# Altium footprint library clusterhead.PcbLib: 75 footprints (part 4 of 5)
Each footprint in its own frame and in the unit in brackets; x right, y up, seen from the top. Pads: shape width x height; smd on the part's side, far side on the other; paste and mask are expansions set on the pad; w line width, h text height; cw(c..) or ccw(c..) is an arc to the next point about the centre after c.
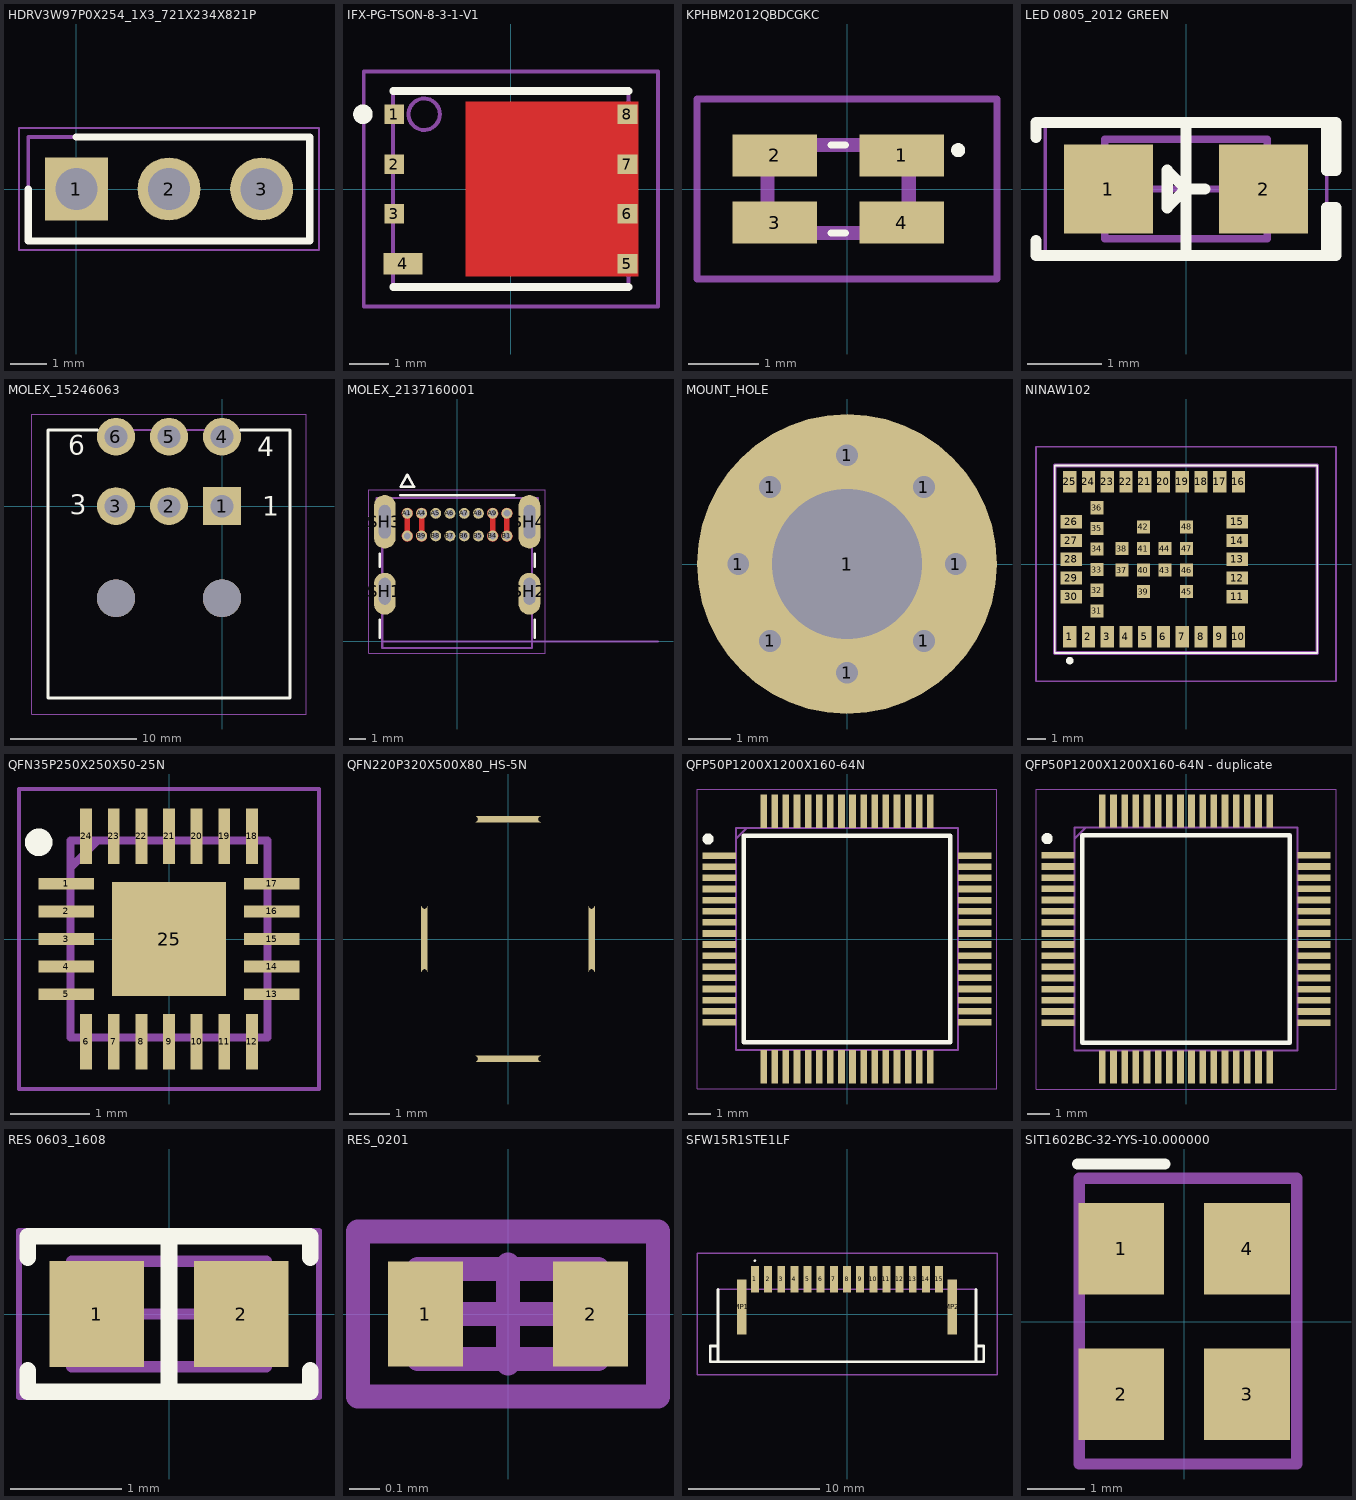
[diagram p3: the footprints below, top view; thin cyan lines are the x and y axes]

## HDRV3W97P0X254_1X3_721X234X821P [mm]
pads (3):
  rect 1.725x1.725 hole 1.15: 1(0,0)
  round 1.725 hole 1.15: 2(2.54,0) 3(5.08,0)
Top Overlay:
  lines w0.2: -1.32,0 -1.32,-1.425 6.4,-1.425 6.4,1.425 0,1.425
Mechanical 13:
  lines w0.1: -1.32,-1.425 -1.32,1.425 6.4,1.425 6.4,-1.425 -1.32,-1.425
Mechanical 15:
  lines w0.05: -1.57,-1.675 -1.57,1.675 6.65,1.675 6.65,-1.675 -1.57,-1.675
3D body "5-146280-3.stp": height 8.12, standoff -3.05, extent -1.067,-1.168 6.147,1.168

## IFX-PG-TSON-8-3-1-V1 [mm] "Transistor; 1.27mm pitch, 8 pin, 6.00mm L X 5.00mm W X 1.1mm H body"
height 1.1
pads (8):
  rect 0.5x0.5 smd paste-0.5 mask-0.5: 1(-2.972,1.905) 2(-2.972,0.635) 3(-2.972,-0.635) 5(2.972,-1.905) 6(2.972,-0.635) 7(2.972,0.635) 8(2.972,1.905)
  rect 1x0.54 smd paste-1 mask+0: 4(-2.75,-1.905)
Top Layer:
  region: 3.25,2.225 3.25,-2.225 -1.15,-2.225 -1.15,2.225
Top Overlay:
  circle w0.25: c-3.772,1.905 r0.125
  lines w0.2: -3,-2.5 3,-2.5 ; -3,2.5 3,2.5
Top Paste:
  region: -2.3,-0.215 -2.3,0.215 -2.75,0.215 -2.75,-0.215
  region: -2.3,1.055 -2.3,1.485 -2.75,1.485 -2.75,1.055
  region: -2.3,-0.856 -2.3,-0.416 -3.2,-0.416 -3.2,-0.856
  region: -2.3,0.415 -2.3,0.855 -3.2,0.855 -3.2,0.415
  region: -2.3,1.685 -2.3,2.125 -3.2,2.125 -3.2,1.685
  region: -2.42,-2.125 -2.42,-1.685 -3.2,-1.685 -3.2,-2.125
  region: 0.675,0.1 0.675,1.6 2.175,1.6 2.175,0.1
  region: 0.675,-1.6 0.675,-0.1 2.175,-0.1 2.175,-1.6
  region: 2.38,-2.125 2.38,-1.685 3.2,-1.685 3.2,-2.125
  region: -1.025,-1.6 -1.025,-0.1 0.475,-0.1 0.475,-1.6
  region: -1.025,0.1 -1.025,1.6 0.475,1.6 0.475,0.1
  region: 2.38,1.685 2.38,2.125 3.2,2.125 3.2,1.685
  region: 2.38,0.855 2.38,0.415 3.2,0.415 3.2,0.855
  region: 2.38,-0.415 2.38,-0.855 3.2,-0.855 3.2,-0.415
Top Solder:
  region: -1.15,2.225 2.52,2.225 2.52,2.175 3.25,2.175 3.25,1.635 2.52,1.635 2.52,0.905 3.25,0.905 3.25,0.365 2.52,0.365 2.52,-0.365 3.25,-0.365 3.25,-0.905 2.52,-0.905 2.52,-1.635 3.25,-1.635 3.25,-2.175 2.52,-2.175 2.52,-2.225 -1.15,-2.225
  region: -3.25,2.175 -2.25,2.175 -2.25,-0.905 -3.25,-0.905 -3.25,-0.365 -2.8,-0.365 -2.8,0.365 -3.25,0.365 -3.25,0.905 -2.8,0.905 -2.8,1.635 -3.25,1.635
Top Courtyard:
  text ".DESIGNATOR" at -3.643,-0.385 h1.2
Mechanical 13:
  circle w0.1: c-2.21,1.905 r0.4
  lines w0.1: -3,-2.5 -3,2.5 3,2.5 3,-2.5 -3,-2.5
Mechanical 15:
  lines w0.1: -0.5,0 0.5,0 ; 0,-0.5 0,0.5 ; -3.75,-3 3.75,-3 3.75,3 -3.75,3 -3.75,-3
3D body "PG-TSON-8-3_Z8B00184858_V02_3D.stp": height 1.11, standoff 0, extent -3,-2.5 3,2.5

## KPHBM2012QBDCGKC [mm]
pads (4):
  rect 1.2x0.6 smd: 1(0.775,0.475) 2(-1.025,0.475) 3(-1.025,-0.475) 4(0.775,-0.475)
Top Overlay:
  lines w0.1: -0.225,-0.625 -0.025,-0.625 ; -0.225,0.625 -0.025,0.625 ; 1.575,0.5 ccw(c1.575,0.55) 1.575,0.6 ccw(c1.575,0.55) 1.575,0.5
Mechanical 13:
  lines w0.2: -1.125,-0.625 0.875,-0.625 0.875,0.625 -1.125,0.625 -1.125,-0.625
Mechanical 15:
  lines w0.1: -2.125,-1.275 2.125,-1.275 2.125,1.275 -2.125,1.275 -2.125,-1.275
3D body "APHBM2012LSURKZGKC.stp": height 0.45, standoff 0, extent -1,-0.625 1,0.625

## LED 0805_2012 GREEN [mm] "Chip Diode, 2-Leads, Body 2.00x1.25mm, IPC Medium Density"
height 0.7
pads (2):
  rect 1.2x1.2 smd: 1(-1.05,0) 2(1.05,0)
Top Overlay:
  lines w0.15: -2.032,-0.7 -2.032,-0.9 1.905,-0.9 ; -2.032,0.7 -2.032,0.9 1.905,0.9 ; 0,-0.9 0,0.9 ; 0.254,0 0,0 ; 0,0 -0.254,0.254 -0.254,-0.254 0,0 ; 1.905,-0.9 1.905,-0.254 2.032,-0.254 2.032,-0.9 1.905,-0.9 ; 1.905,0.9 1.905,0.254 2.032,0.254 2.032,0.9 1.905,0.9
Mechanical 13:
  lines w0.1: -1.1,-0.675 1.1,-0.675 1.1,0.675 -1.1,0.675 -1.1,-0.675
Mechanical 15:
  lines w0.05: -1.905,-0.95 1.905,-0.95 1.905,0.95 -1.905,0.95 -1.905,-0.95
  lines w0.1: -0.5,0 0.5,0 ; 0,-0.5 0,0.5
3D body "LED 0805 Base GREEN.STEP": height 0.4, standoff 0, extent -1,-0.625 1,0.625
3D body "LED 0805 Lens GREEN.STEP": height 0.9, standoff 0.3, extent -0.65,-0.625 0.65,0.625

## MOLEX_15246063 [mm]
height 15
pads (8):
  rect 3x3 / inner round 3 / far side rect 3x3 hole 1.8: 1(0,0)
  round 3 hole 1.8: 2(-4.2,0) 3(-8.4,0) 4(0,5.5) 5(-4.2,5.5) 6(-8.4,5.5)
  round 3 hole 3 unplated mask+0.076: ""(-8.4,-7.3) ""(0,-7.3)
Top Overlay:
  lines w0.25: -9.876,6.03 -13.8,6.03 -13.8,-15.2 5.4,-15.2 5.4,6.03 1.476,6.03
  text "6" at -12.192,4.064 h1.52
  text "3" at -12.065,-0.635 h1.52
  text "4" at 2.794,3.937 h1.52
  text "1" at 3.175,-0.762 h1.52
Mechanical 13:
  lines w0.127: -13.8,-15.2 -13.8,6.03 5.4,6.03 5.4,-15.2 -13.8,-15.2
Mechanical 15:
  lines w0.05: -15.07,-16.47 -15.07,7.3 6.67,7.3 6.67,-16.47 -15.07,-16.47
3D body "15246063.stp": height 15, standoff -3.6, extent -13.866,-15.185 5.334,6.041

## MOLEX_2137160001 [mm]
height 3.36
pads (20):
  round 0.648 hole 0.4 mask+0.064: A1(-2.975,7.65) A4(-2.125,7.65) A5(-1.275,7.65) A6(-0.425,7.65) A7(0.425,7.65) A8(1.275,7.65) A9(2.125,7.65) A12(2.975,7.65) B1(2.975,6.3) B4(2.125,6.3) B5(1.275,6.3) B6(0.425,6.3) B7(-0.425,6.3) B8(-1.275,6.3) B9(-2.125,6.3) B12(-2.975,6.3)
  oval 1.3x2.5 hole 0.7 slot 1.6 at 90 deg copper offset 0,-0.15 mask+0.064: SH1(-4.32,3) SH2(4.32,3)
  oval 1.3x3.2 hole 0.7 slot 2 at 90 deg mask+0.064: SH3(-4.32,7.15) SH4(4.32,7.15)
Top Layer:
  region: 3.032,7.969 3.087,7.954 3.139,7.929 3.186,7.896 3.226,7.855 3.258,7.808 3.281,7.756 3.295,7.7 3.299,7.643 3.293,7.586 3.277,7.531 3.251,7.48 3.217,7.434 3.175,7.395 3.125,7.363 3.125,6.587 3.175,6.555 3.217,6.516 3.251,6.47 3.277,6.419 3.293,6.364 3.299,6.307 3.295,6.25 3.281,6.194 3.258,6.142 3.226,6.095 3.186,6.054 3.139,6.021 3.087,5.996 3.032,5.981 2.975,5.976 2.918,5.981 2.863,5.996 2.811,6.021 2.764,6.054 2.724,6.095 2.692,6.142 2.669,6.194 2.655,6.25 2.651,6.307 2.657,6.364 2.673,6.419 2.699,6.47 2.733,6.516 2.775,6.555 2.825,6.587 2.825,7.363 2.775,7.395 2.733,7.434 2.699,7.48 2.673,7.531 2.657,7.586 2.651,7.643 2.655,7.7 2.669,7.756 2.692,7.808 2.724,7.855 2.764,7.896 2.811,7.929 2.863,7.954 2.918,7.969 2.975,7.974
  region: 2.182,7.969 2.237,7.954 2.289,7.929 2.336,7.896 2.376,7.855 2.408,7.808 2.431,7.756 2.445,7.7 2.449,7.643 2.443,7.586 2.427,7.531 2.401,7.48 2.367,7.434 2.325,7.395 2.275,7.363 2.275,6.587 2.325,6.555 2.367,6.516 2.401,6.47 2.427,6.419 2.443,6.364 2.449,6.307 2.445,6.25 2.431,6.194 2.408,6.142 2.376,6.095 2.336,6.054 2.289,6.021 2.237,5.996 2.182,5.981 2.125,5.976 2.068,5.981 2.013,5.996 1.961,6.021 1.914,6.054 1.874,6.095 1.842,6.142 1.819,6.194 1.805,6.25 1.801,6.307 1.807,6.364 1.823,6.419 1.849,6.47 1.883,6.516 1.925,6.555 1.975,6.587 1.975,7.363 1.925,7.395 1.883,7.434 1.849,7.48 1.823,7.531 1.807,7.586 1.801,7.643 1.805,7.7 1.819,7.756 1.842,7.808 1.874,7.855 1.914,7.896 1.961,7.929 2.013,7.954 2.068,7.969 2.125,7.974
  region: -2.068,7.969 -2.013,7.954 -1.961,7.929 -1.914,7.896 -1.874,7.855 -1.842,7.808 -1.819,7.756 -1.805,7.7 -1.801,7.643 -1.807,7.586 -1.823,7.531 -1.849,7.48 -1.883,7.434 -1.925,7.395 -1.975,7.363 -1.975,6.587 -1.925,6.555 -1.883,6.516 -1.849,6.47 -1.823,6.419 -1.807,6.364 -1.801,6.307 -1.805,6.25 -1.819,6.194 -1.842,6.142 -1.874,6.095 -1.914,6.054 -1.961,6.021 -2.013,5.996 -2.068,5.981 -2.125,5.976 -2.182,5.981 -2.237,5.996 -2.289,6.021 -2.336,6.054 -2.376,6.095 -2.408,6.142 -2.431,6.194 -2.445,6.25 -2.449,6.307 -2.443,6.364 -2.427,6.419 -2.401,6.47 -2.367,6.516 -2.325,6.555 -2.275,6.587 -2.275,7.363 -2.325,7.395 -2.367,7.434 -2.401,7.48 -2.427,7.531 -2.443,7.586 -2.449,7.643 -2.445,7.7 -2.431,7.756 -2.408,7.808 -2.376,7.855 -2.336,7.896 -2.289,7.929 -2.237,7.954 -2.182,7.969 -2.125,7.974
  region: -2.918,7.969 -2.863,7.954 -2.811,7.929 -2.764,7.896 -2.724,7.855 -2.692,7.808 -2.669,7.756 -2.655,7.7 -2.651,7.643 -2.657,7.586 -2.673,7.531 -2.699,7.48 -2.733,7.434 -2.775,7.395 -2.825,7.363 -2.825,6.587 -2.775,6.555 -2.733,6.516 -2.699,6.47 -2.673,6.419 -2.657,6.364 -2.651,6.307 -2.655,6.25 -2.669,6.194 -2.692,6.142 -2.724,6.095 -2.764,6.054 -2.811,6.021 -2.863,5.996 -2.918,5.981 -2.975,5.976 -3.032,5.981 -3.087,5.996 -3.139,6.021 -3.186,6.054 -3.226,6.095 -3.258,6.142 -3.281,6.194 -3.295,6.25 -3.299,6.307 -3.293,6.364 -3.277,6.419 -3.251,6.47 -3.217,6.516 -3.175,6.555 -3.125,6.587 -3.125,7.363 -3.175,7.395 -3.217,7.434 -3.251,7.48 -3.277,7.531 -3.293,7.586 -3.299,7.643 -3.295,7.7 -3.281,7.756 -3.258,7.808 -3.226,7.855 -3.186,7.896 -3.139,7.929 -3.087,7.954 -3.032,7.969 -2.975,7.974
Top Overlay:
  lines w0.15: -4.625,0.225 -4.625,1.3 ; -4.625,4.45 -4.625,5.25 ; -3.4,8.72 3.4,8.72 ; 4.625,0.225 4.625,1.3 ; 4.625,4.45 4.625,5.25 ; -3.375,9.25 -2.975,9.95 -2.575,9.25 -3.375,9.25
Top Solder:
  drawing of 4 lines, arcs and shapes, not listed
Top Courtyard:
  text "'.Designator'" at 0,4.625 h0.7
Mechanical 12:
  text "PTH Slot 1.6 +/- 0.05 X 0.7 +/- 0.05" at -4.878,12.053 h0.5
  text "PTH Slot 2.0 +/- 0.05 X 0.7 +/- 0.05" at -4.878,12.688 h0.5
Mechanical 13:
  lines w0.13: 12,0 -4.475,0 ; -4.475,0 -4.475,-0.4 4.475,-0.4 4.475,6.17 4.82,6.17 4.82,8.57 -4.82,8.57 -4.82,6.17 -4.475,6.17 -4.475,0 ; -3.375,9.25 -2.975,9.95 -2.575,9.25 -3.375,9.25
  text "PCB Edge" at 5.5,0.25 h1
Mechanical 15:
  lines w0.01: -5.27,-0.7 5.27,-0.7 5.27,9.05 -5.27,9.05 -5.27,-0.7
3D body "2137160001.stp": height 3.17, standoff -1.19, extent -4.82,-0.421 4.82,8.549

## MOUNT_HOLE [mil]
pads (9):
  round 20 hole 20: 1(-100,0) 1(-70.71,-70.71) 1(-70.71,70.71) 1(0,-100) 1(0,100) 1(70.71,-70.71) 1(70.71,70.71) 1(100,0)
  round 275.59 hole 137.8: 1(0,0)

## NINAW102 [mm]
pads (48):
  rect 0.7x1.15 smd: 1(-6.2,-3.875) 2(-5.2,-3.875) 3(-4.2,-3.875) 4(-3.2,-3.875) 5(-2.2,-3.875) 6(-1.2,-3.875) 7(-0.2,-3.875) 8(0.8,-3.875) 9(1.8,-3.875) 10(2.8,-3.875) 16(2.8,4.375) 17(1.8,4.375) 18(0.8,4.375) 19(-0.2,4.375) 20(-1.2,4.375) 21(-2.2,4.375) 22(-3.2,4.375) 23(-4.2,4.375) 24(-5.2,4.375) 25(-6.2,4.375)
  rect 1.15x0.7 smd: 11(2.725,-1.75) 12(2.725,-0.75) 13(2.725,0.25) 14(2.725,1.25) 15(2.725,2.25) 26(-6.125,2.25) 27(-6.125,1.25) 28(-6.125,0.25) 29(-6.125,-0.75) 30(-6.125,-1.75)
  rect 0.7x0.7 smd: 31(-4.75,-2.5) 32(-4.75,-1.4) 33(-4.75,-0.3) 34(-4.75,0.8) 35(-4.75,1.9) 36(-4.75,3) 37(-3.42,-0.325) 38(-3.42,0.825) 39(-2.27,-1.475) 40(-2.27,-0.325) 41(-2.27,0.825) 42(-2.27,1.975) 43(-1.12,-0.325) 44(-1.12,0.825) 45(0.03,-1.475) 46(0.03,-0.325) 47(0.03,0.825) 48(0.03,1.975)
Top Overlay:
  lines w0.1: -7,-4.75 -7,5.25 7,5.25 7,-4.75 -7,-4.75
  lines w0.2: -6.3,-5.15 ccw(c-6.2,-5.15) -6.1,-5.15 ccw(c-6.2,-5.15) -6.3,-5.15
Mechanical 13:
  lines w0.2: -7,-4.75 -7,5.25 7,5.25 7,-4.75 -7,-4.75
Mechanical 15:
  lines w0.1: -8,-6.25 -8,6.25 8,6.25 8,-6.25 -8,-6.25
3D body "NINA-W102.stp": height 3.1, standoff 0, extent -7,-4.75 7,5.25

## QFN35P250X250X50-25N [mm]
pads (25):
  rect 0.7x0.15 smd: 1(-1.3,0.7) 2(-1.3,0.35) 3(-1.3,0) 4(-1.3,-0.35) 5(-1.3,-0.7) 13(1.3,-0.7) 14(1.3,-0.35) 15(1.3,0) 16(1.3,0.35) 17(1.3,0.7)
  rect 0.15x0.7 smd: 6(-1.05,-1.3) 7(-0.7,-1.3) 8(-0.35,-1.3) 9(0,-1.3) 10(0.35,-1.3) 11(0.7,-1.3) 12(1.05,-1.3) 18(1.05,1.3) 19(0.7,1.3) 20(0.35,1.3) 21(0,1.3) 22(-0.35,1.3) 23(-0.7,1.3) 24(-1.05,1.3)
  rect 1.45x1.45 smd: 25(0,0)
Top Overlay:
  circle w0.175: c-1.649,1.225 r0.088
Mechanical 13:
  lines w0.1: -1.25,0.9 -0.9,1.25 ; -1.25,-1.25 -1.25,1.25 1.25,1.25 1.25,-1.25 -1.25,-1.25
Mechanical 15:
  lines w0.05: -1.9,-1.9 -1.9,1.9 1.9,1.9 1.9,-1.9 -1.9,-1.9
3D body "PI3WVR626XEBEX.stp": height 0.5, standoff 0, extent -1.3,-1.3 1.3,1.3

## QFN220P320X500X80_HS-5N [mm] "QFN, 4-Leads, Body 3.20x5.00mm, Pitch 2.54mm/2.20mm, Thermal Pad 4.04x3.80mm, IPC Medium Density"
height 0.8
pads (4):
  oval 0x1.5 smd: 1(-2.075,0) 3(2.075,0)
  oval 1.5x0 smd: 2(0,-2.975) 4(0,2.975)

## QFP50P1200X1200X160-64N [mm]
pads (64):
  rect 1.5x0.3 smd: 1(-5.75,3.75) 2(-5.75,3.25) 3(-5.75,2.75) 4(-5.75,2.25) 5(-5.75,1.75) 6(-5.75,1.25) 7(-5.75,0.75) 8(-5.75,0.25) 9(-5.75,-0.25) 10(-5.75,-0.75) 11(-5.75,-1.25) 12(-5.75,-1.75) 13(-5.75,-2.25) 14(-5.75,-2.75) 15(-5.75,-3.25) 16(-5.75,-3.75) 33(5.75,-3.75) 34(5.75,-3.25) 35(5.75,-2.75) 36(5.75,-2.25) 37(5.75,-1.75) 38(5.75,-1.25) 39(5.75,-0.75) 40(5.75,-0.25) 41(5.75,0.25) 42(5.75,0.75) 43(5.75,1.25) 44(5.75,1.75) 45(5.75,2.25) 46(5.75,2.75) 47(5.75,3.25) 48(5.75,3.75)
  rect 0.3x1.5 smd: 17(-3.75,-5.75) 18(-3.25,-5.75) 19(-2.75,-5.75) 20(-2.25,-5.75) 21(-1.75,-5.75) 22(-1.25,-5.75) 23(-0.75,-5.75) 24(-0.25,-5.75) 25(0.25,-5.75) 26(0.75,-5.75) 27(1.25,-5.75) 28(1.75,-5.75) 29(2.25,-5.75) 30(2.75,-5.75) 31(3.25,-5.75) 32(3.75,-5.75) 49(3.75,5.75) 50(3.25,5.75) 51(2.75,5.75) 52(2.25,5.75) 53(1.75,5.75) 54(1.25,5.75) 55(0.75,5.75) 56(0.25,5.75) 57(-0.25,5.75) 58(-0.75,5.75) 59(-1.25,5.75) 60(-1.75,5.75) 61(-2.25,5.75) 62(-2.75,5.75) 63(-3.25,5.75) 64(-3.75,5.75)
Top Overlay:
  circle w0.25: c-6.25,4.5 r0.125
  lines w0.2: -4.65,-4.65 -4.65,4.65 4.65,4.65 4.65,-4.65 -4.65,-4.65
Mechanical 13:
  lines w0.1: -5,4.5 -4.5,5 ; -5,-5 -5,5 5,5 5,-5 -5,-5
Mechanical 15:
  lines w0.05: -6.75,-6.75 -6.75,6.75 6.75,6.75 6.75,-6.75 -6.75,-6.75
3D body "FT4232HL-TRAY.stp": height 1.6, standoff 0, extent -6,-6 6,6

## QFP50P1200X1200X160-64N - duplicate [mm]
pads (64):
  rect 1.475x0.3 smd: 1(-5.738,3.75) 2(-5.738,3.25) 3(-5.738,2.75) 4(-5.738,2.25) 5(-5.738,1.75) 6(-5.738,1.25) 7(-5.738,0.75) 8(-5.738,0.25) 9(-5.738,-0.25) 10(-5.738,-0.75) 11(-5.738,-1.25) 12(-5.738,-1.75) 13(-5.738,-2.25) 14(-5.738,-2.75) 15(-5.738,-3.25) 16(-5.738,-3.75) 33(5.738,-3.75) 34(5.738,-3.25) 35(5.738,-2.75) 36(5.738,-2.25) 37(5.738,-1.75) 38(5.738,-1.25) 39(5.738,-0.75) 40(5.738,-0.25) 41(5.738,0.25) 42(5.738,0.75) 43(5.738,1.25) 44(5.738,1.75) 45(5.738,2.25) 46(5.738,2.75) 47(5.738,3.25) 48(5.738,3.75)
  rect 0.3x1.475 smd: 17(-3.75,-5.738) 18(-3.25,-5.738) 19(-2.75,-5.738) 20(-2.25,-5.738) 21(-1.75,-5.738) 22(-1.25,-5.738) 23(-0.75,-5.738) 24(-0.25,-5.738) 25(0.25,-5.738) 26(0.75,-5.738) 27(1.25,-5.738) 28(1.75,-5.738) 29(2.25,-5.738) 30(2.75,-5.738) 31(3.25,-5.738) 32(3.75,-5.738) 49(3.75,5.738) 50(3.25,5.738) 51(2.75,5.738) 52(2.25,5.738) 53(1.75,5.738) 54(1.25,5.738) 55(0.75,5.738) 56(0.25,5.738) 57(-0.25,5.738) 58(-0.75,5.738) 59(-1.25,5.738) 60(-1.75,5.738) 61(-2.25,5.738) 62(-2.75,5.738) 63(-3.25,5.738) 64(-3.75,5.738)
Top Overlay:
  circle w0.25: c-6.225,4.5 r0.125
  lines w0.2: -4.65,-4.65 4.65,-4.65 4.65,4.65 -4.65,4.65 -4.65,-4.65
Mechanical 13:
  lines w0.1: -5,4.5 -4.5,5 ; -5,-5 5,-5 5,5 -5,5 -5,-5
Mechanical 15:
  lines w0.05: -6.725,-6.725 6.725,-6.725 6.725,6.725 -6.725,6.725 -6.725,-6.725
3D body "STM32G431RBT6.stp": height 1.6, standoff 0, extent -6,-6 6,6

## RES 0603_1608 [mm] "Chip Resistor, 2-Leads, Body 1.60x0.80mm, IPC Medium Density"
height 0.45
pads (2):
  rect 0.85x0.95 smd: 1(-0.65,0) 2(0.65,0)
Top Overlay:
  lines w0.15: -1.27,-0.508 -1.27,-0.7 1.27,-0.7 1.27,-0.508 ; -1.27,0.508 -1.27,0.7 1.27,0.7 1.27,0.508 ; 0,-0.7 0,0.7
Mechanical 13:
  lines w0.1: -0.875,-0.475 -0.875,0.475 0.875,0.475 0.875,-0.475 -0.875,-0.475
Mechanical 15:
  lines w0.05: -1.35,-0.75 -1.35,0.75 1.35,0.75 1.35,-0.75 -1.35,-0.75
  lines w0.1: -0.475,0 0.475,0 ; 0,-0.475 0,0.475
3D body "0603 resistor.STEP": height 0.45, standoff 0, extent -0.8,-0.4 0.8,0.4

## RES_0201 [mm] "Chip Resistor, 2-Leads, Body 0.60x0.30mm, IPC Medium Density"
height 0.26
pads (2):
  rect 0.25x0.35 smd: 1(-0.275,0) 2(0.275,0)
Top Courtyard:
  lines w0.08: -0.5,-0.275 -0.5,0.275 0.5,0.275 0.5,-0.275 -0.5,-0.275
Top Component Outline:
  lines w0.08: -0.3,-0.15 0.3,-0.15 0.3,0.15 -0.3,0.15 -0.3,-0.15
Top Assembly:
  lines w0.08: -0.5,-0.275 0.5,-0.275 0.5,0.275 -0.5,0.275 -0.5,-0.275
Top Component Center:
  lines w0.08: -0.165,0 0.165,0 ; -0.05,0 0.05,0 ; 0,-0.165 0,0.165 ; 0,-0.05 0,0.05
3D body "R_0201_0603Metric.step": height 0.22, standoff -0.01, extent -0.3,-0.15 0.3,0.15

## SFW15R1STE1LF [mm]
pads (17):
  rect 0.6x2 smd: 1(-7,2.635) 2(-6,2.635) 3(-5,2.635) 4(-4,2.635) 5(-3,2.635) 6(-2,2.635) 7(-1,2.635) 8(0,2.635) 9(1,2.635) 10(2,2.635) 11(3,2.635) 12(4,2.635) 13(5,2.635) 14(6,2.635) 15(7,2.635)
  rect 0.7x4.2 smd: MP1(-8,0.535) MP2(8,0.535)
Top Overlay:
  lines w0.1: -7,4 cw(c-7,4.05) -7,4.1 cw(c-7,4.05) -7,4
  lines w0.2: -9.8,-2.435 -10.4,-2.435 -10.4,-3.635 -9.8,-3.635 ; -9.8,1.865 -9.8,-3.635 ; 9.8,-2.435 10.4,-2.435 10.4,-3.635 9.8,-3.635 ; 9.8,1.865 9.8,-3.635 ; -9.8,-3.635 9.8,-3.635
Mechanical 13:
  lines w0.1: -9.8,-2.435 -10.4,-2.435 -10.4,-3.635 -9.8,-3.635 ; 9.8,-2.435 10.4,-2.435 10.4,-3.635 9.8,-3.635 ; -9.8,-3.635 9.8,-3.635 ; -9.8,-3.635 -9.8,1.865 9.8,1.865 9.8,-3.635
Mechanical 15:
  lines w0.1: -11.4,-4.635 11.4,-4.635 11.4,4.635 -11.4,4.635 -11.4,-4.635
3D body "SFW15R-1STE1LF.stp": height 2.67, standoff -0.03, extent -10.4,-3.25 10.4,3.25

## SIT1602BC-32-YYS-10.000000 [mm]
pads (4):
  rect 1.5x1.6 smd: 1(-1.1,1.27) 2(-1.1,-1.27) 3(1.1,-1.27) 4(1.1,1.27)
Top Overlay:
  lines w0.2: -1.861,2.752 -0.337,2.752
Top 3D Body:
  lines w0.2: -1.836,-2.487 1.963,-2.487 1.963,2.502 -1.836,2.502 -1.836,-2.487
3D body: height 0.75, standoff 0, extent -1.6,-2.5 1.6,2.5